# Altium footprint library Fred..PcbLib: 39 footprints (part 2 of 3)
Each footprint in its own frame and in the unit in brackets; x right, y up, seen from the top. Pads: shape width x height; smd on the part's side, far side on the other; paste and mask are expansions set on the pad; w line width, h text height; cw(c..) or ccw(c..) is an arc to the next point about the centre after c.
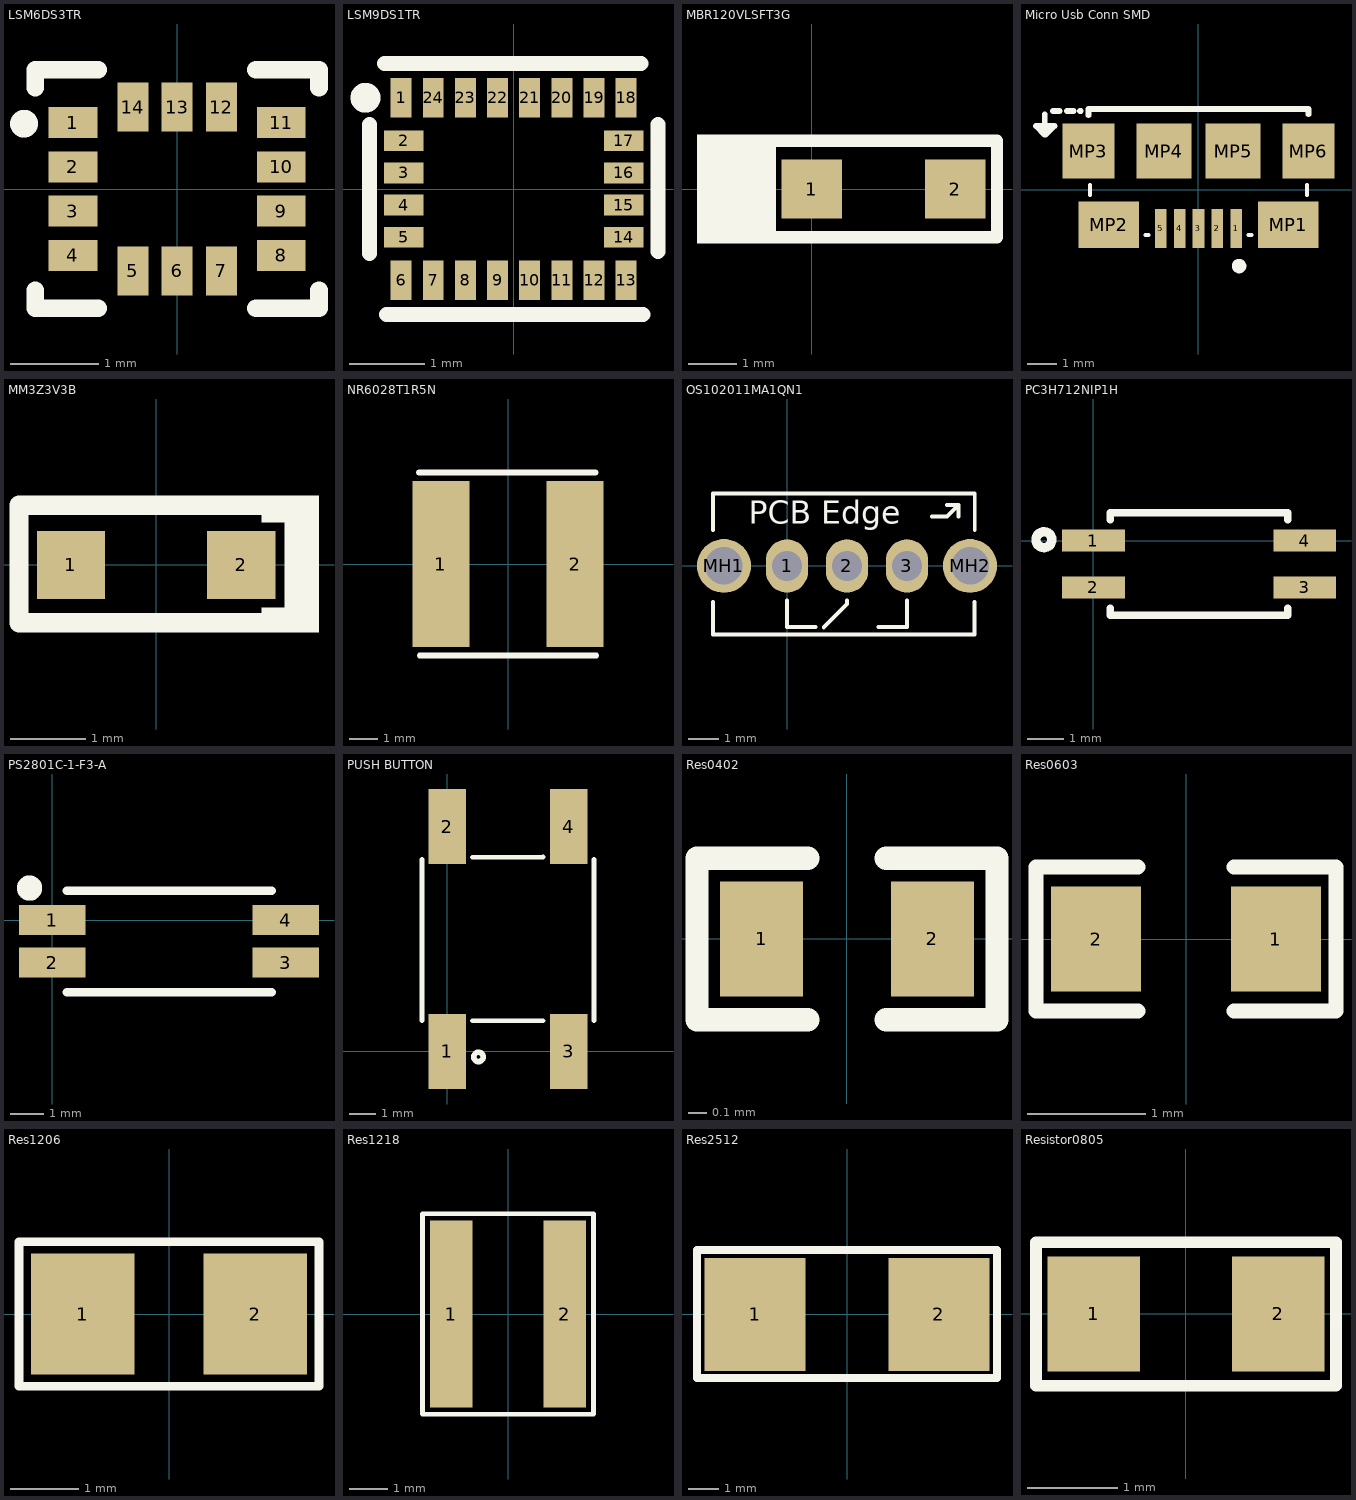
[diagram p1: the footprints below, top view; thin cyan lines are the x and y axes]

## LSM6DS3TR [mm] "IMU ACCEL/GYRO I2C/SPI 14VFLGA"
pads (14):
  rect 0.55x0.35 smd: 1(-1.175,0.75) 2(-1.175,0.25) 3(-1.175,-0.25) 4(-1.175,-0.75) 8(1.175,-0.75) 9(1.175,-0.25) 10(1.175,0.25) 11(1.175,0.75)
  rect 0.35x0.55 smd: 5(-0.5,-0.925) 6(0,-0.925) 7(0.5,-0.925) 12(0.5,0.925) 13(0,0.925) 14(-0.5,0.925)
Top Overlay:
  circle w0.2: c-1.727,0.737 r0.057
  lines w0.2: -1.6,-1.143 -1.6,-1.346 -0.889,-1.346 ; -1.6,1.143 -1.6,1.346 -0.889,1.346 ; 0.889,-1.346 1.6,-1.346 1.6,-1.143 ; 0.889,1.346 1.6,1.346 1.6,1.143
3D body "LSM6DS3TR--3DModel-STEP-56544.STEP": height 0.85, standoff -0.01, extent -1.5,-1.25 1.5,1.25

## LSM9DS1TR [mm] "IMU ACCEL/GYRO/MAG I2C/SPI 24LGA"
pads (24):
  rect 0.28x0.53 smd: 1(-1.505,1.22) 6(-1.505,-1.22) 7(-1.075,-1.22) 8(-0.645,-1.22) 9(-0.215,-1.22) 10(0.215,-1.22) 11(0.645,-1.22) 12(1.075,-1.22) 13(1.505,-1.22) 18(1.505,1.22) 19(1.075,1.22) 20(0.645,1.22) 21(0.215,1.22) 22(-0.215,1.22) 23(-0.645,1.22) 24(-1.075,1.22)
  rect 0.53x0.28 smd: 2(-1.47,0.645) 3(-1.47,0.215) 4(-1.47,-0.215) 5(-1.47,-0.645) 14(1.47,-0.645) 15(1.47,-0.215) 16(1.47,0.215) 17(1.47,0.645)
Top Overlay:
  circle w0.2: c-1.981,1.22 r0.1
  lines w0.2: -1.93,-0.864 -1.93,0.864 ; -1.727,1.676 1.702,1.676 ; -1.702,-1.676 1.727,-1.676 ; 1.93,-0.838 1.93,0.864
3D body "User Library-LGA-24L.step": height 0.97, standoff -0.03, extent -1.747,-1.5 1.753,1.5

## MBR120VLSFT3G [mm] "DIODE SCHOTTKY 20V 1A SOD123FL"
pads (2):
  rect 1.25x1.22 smd: 1(0,0) 2(2.95,0)
Top Overlay:
  rectangle: -2.362,-1.118 -0.737,1.118
  lines w0.254: -1.245,0.991 3.785,0.991 ; -1.219,-0.991 3.81,-0.991 3.81,0.991
3D body "User Library-SOD123F.step": height 1.2, standoff -0.01, extent -0.401,-0.85 3.349,0.85

## Micro Usb Conn SMD [mm] "CONN RCPT USB2.0 MICRO B SMD R/A"
pads (11):
  rect 0.4x1.35 smd: 1(1.3,-1.338) 2(0.65,-1.338) 3(0,-1.338) 4(-0.65,-1.338) 5(-1.3,-1.338)
  rect 2.1x1.6 smd: MP1(3.1,-1.212) MP2(-3.1,-1.212)
  rect 1.8x1.9 smd: MP3(-3.8,1.338) MP6(3.8,1.338)
  rect 1.9x1.9 smd: MP4(-1.2,1.338) MP5(1.2,1.338)
Top Overlay:
  circle w0.3: c1.4,-2.638 r0.1
  lines w0.127: -3.75,-0.188 -3.75,0.162 ; -1.83,-1.563 -1.72,-1.563 ; 1.72,-1.563 1.83,-1.563 ; 3.75,-0.188 3.75,0.162
  lines w0.2: -5.309,2.611 -5.309,1.9 -5.613,2.204 -4.978,2.204 -5.283,1.9 ; -5.029,2.718 -4.801,2.718 ; -4.547,2.718 -4.318,2.718 ; -4.089,2.718 -4.064,2.718 ; -3.8,2.575 -3.8,2.788 3.8,2.788 3.8,2.611
3D body "10118192C.stp": height 2.74, standoff -0.27, extent -3.95,-1.575 3.962,4.086

## MM3Z3V3B [mm] "DIODE ZENER 3.3V 200MW SOD323F"
pads (2):
  rect 0.9x0.9 smd: 1(-1.125,0) 2(1.125,0)
Top Overlay:
  rectangle: 1.39,-0.889 2.152,-0.559
  rectangle: 1.694,-0.813 2.152,0.686
  rectangle: 1.39,0.559 2.152,0.914
  lines w0.254: 1.644,-0.762 -1.811,-0.762 -1.811,0.787 1.644,0.787
3D body "User Library-SOD-323F.STEP": height 0.75, standoff -0.12, extent -1.383,-0.664 1.317,0.686
3D body "User Library-SOD-323F-1.step": height 0.6, standoff -0.11, extent -1.283,-0.615 1.217,0.635

## NR6028T1R5N [mm] "FIXED IND 1.5UH 4.2A 20.8 MOHM"
pads (2):
  rect 2x5.8 smd: 1(-2.35,0) 2(2.35,0)
Top Overlay:
  lines w0.2: -3.112,3.2 3.06,3.2 ; -3.086,-3.2 3.087,-3.2
3D body "IND_TAIYO_NR6028.step": height 2.79, standoff 0, extent -3.112,-3.101 3.086,3.101

## OS102011MA1QN1 [mm] "2 Position SPDT Miniature Slide Switch 100MA 12V Through Hole, Right Angle"
pads (5):
  oval 1.4x1.778 hole 1: 1(0,0) 2(2,0) 3(4,0)
  round 1.8 hole 1.25: MH1(-2.1,0) MH2(6.1,0)
Top Overlay:
  lines w0.127: -2.464,-1.194 -2.464,-2.286 6.248,-2.286 6.248,-1.194 ; -2.464,1.194 -2.464,2.413 6.261,2.413 6.261,1.194 ; 0,-1.143 0,-2.032 0.952,-2.032 ; 1.222,-2.048 2,-1.27 2,-1.143 ; 3.048,-2.032 4,-2.032 4,-1.143 ; 4.826,1.651 5.334,1.651 5.715,2.032 ; 5.334,2.032 5.715,2.032 ; 5.715,1.651 5.715,2.032
  text "PCB Edge" at -1.27,1.397 h0.76
3D body "User Library-CK_Slide.step": height 4.71, standoff -2.78, extent -2.4,-2.286 6.21,6.086

## PC3H712NIP1H [mm] "OPTOISOLATOR TRANSISTOR SMD"
pads (4):
  rect 1.7x0.6 smd: 1(0,0) 2(0,-1.27) 3(5.74,-1.27) 4(5.74,0)
Top Overlay:
  circle w0.254: c-1.346,0.025 r0.216
  lines w0.2: 0.457,-1.829 0.457,-2.032 5.283,-2.032 5.283,-1.829 ; 0.457,0.559 0.457,0.762 5.283,0.762 5.283,0.559
3D body "User Library-ACPL-217-56DE.step": height 2.01, standoff -0.12, extent -0.604,-1.94 6.396,0.66

## PS2801C-1-F3-A [mm]
pads (4):
  rect 2x0.9 smd: 1(0,0) 2(0,-1.27) 3(7,-1.27) 4(7,0)
Top Overlay:
  circle w0.4: c-0.686,0.965 r0.18
  lines w0.254: 0.432,-2.159 6.579,-2.159 ; 0.432,0.889 6.579,0.889
3D body "User Library-SOP-4-1.step": height 2.1, standoff 0, extent 0.107,-2.022 7.107,0.777

## PUSH BUTTON [mil] "4-Pin SMT"
pads (4):
  rect 55x110 smd: 1(0,0) 2(0,328.9) 3(178,0) 4(178,328.9)
Top Overlay:
  circle w8: c45.76,-8.12 r6.86
  lines w7: -37,45 -37,281.22 ; 37,45 140,45 ; 37,284 140,284.22 ; 215,45 215,281.22
3D body "TL3301NFxxxxG.stp": height 169.33, standoff -3.9, extent -28.11,-31.85 208.11,361.85

## Res0402 [mil]
pads (2):
  rect 18x25 smd: 1(-18.5,0) 2(18.5,0)
Top Overlay:
  lines w5: -8.5,-17.5 -32.5,-17.5 -32.5,17.5 -8.5,17.5 ; 8.5,-17.5 32.5,-17.5 32.5,17.5 8.5,17.5
3D body "User Library-RES_1005-0402.step": height 16.14, standoff 0, extent -22.63,-10.82 22.64,10.83

## Res0603 [mil]
pads (2):
  rect 30x35 smd: 1(30,0) 2(-30,0)
Top Overlay:
  lines w5: -16,-24 -50,-24 -50,24 -16,24 ; 16,-24 50,-24 50,24 16,24
3D body "User Library-RESC1608X05N.step": height 17.76, standoff 0, extent -30.51,-16.73 30.52,16.74

## Res1206 [mil]
pads (2):
  rect 60x70 smd: 1(-50,0) 2(50,0)
Top Overlay:
  lines w5: -87,-42 87,-42 87,42 -84,42 -87,42 -87,-42
3D body "User Library-1206 SMD Resistor.step": height 39.45, standoff 0, extent -62.99,-31.49 63,31.51

## Res1218 [mm]
pads (2):
  rect 1.09x4.82 smd: 1(-1.465,0) 2(1.465,0)
Top Overlay:
  lines w0.127: -2.21,-2.591 -2.21,2.591 2.21,2.591 2.21,-2.591 -2.21,-2.591
3D body "User Library-SMD Resistors.step": height 0.28, standoff -0.28, extent -1.651,-2.286 1.549,2.324

## Res2512 [mm]
pads (2):
  rect 3.3x3.7 smd: 1(-3,0) 2(3,0)
Top Overlay:
  lines w0.254: -4.902,-2.083 -4.902,2.108 4.902,2.108 4.902,-2.083 -4.902,-2.083
3D body "User Library-2512 SMD Resistor.step": height 1.6, standoff 0, extent -3.099,-1.5 3.251,1.5

## Resistor0805 [mil] "SMD 0805"
pads (2):
  rect 40x50 smd: 1(-40,0) 2(40,0)
Top Overlay:
  lines w5: -65,-31 65,-31 65,31 -65,31 -65,-31
3D body "User Library-CR2012-0805.STEP": height 23.62, standoff 0, extent -39.34,-24.75 39.4,24.46